# Altium schematic symbol library Passives-LIB-SCH.SchLib: 32 symbols
Pins are listed as number, name and electrical type; pins without a type are passive.

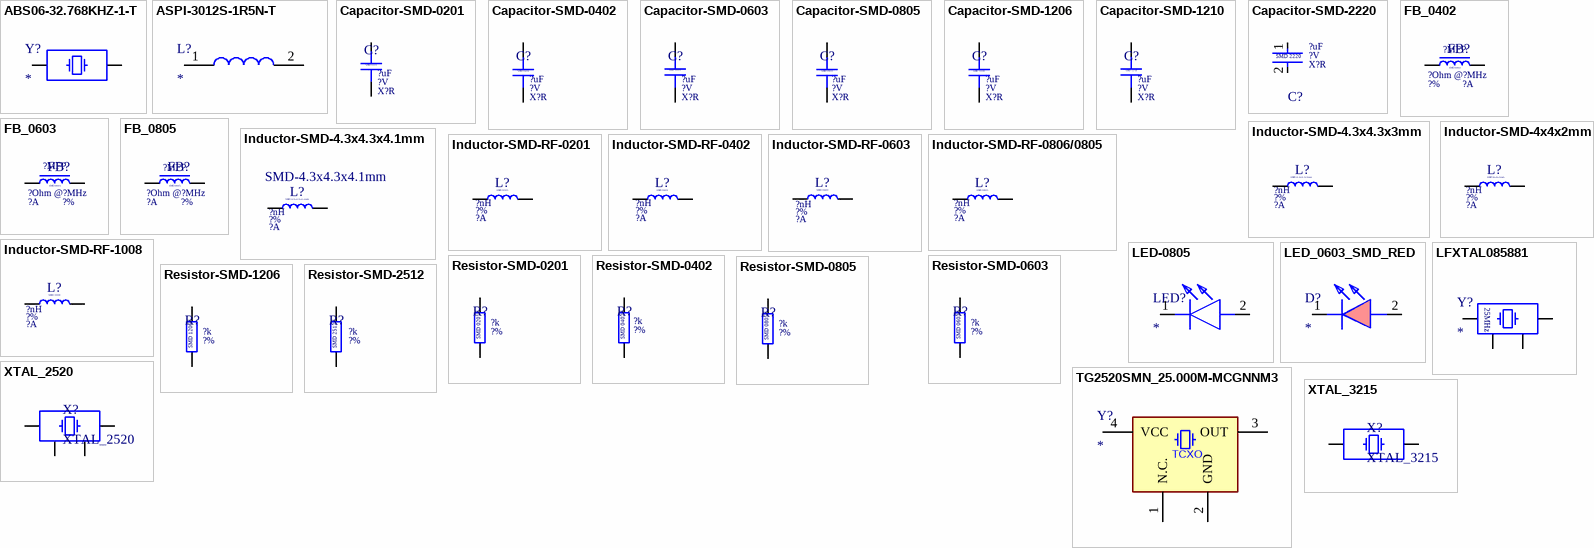
[diagram p0: symbols ABS06-32.768KHZ-1-T to XTAL_3215]

## ABS06-32.768KHZ-1-T
designator Y?
32.768kHz Crystal or Oscillator 12.5pF 20ppm; Manufacturer: ABRACON; Manufacturer Part Number: ABS06-32.768KHZ-1-T; Est Price INR: 90.38; Population Status: YES; Datasheet Link: https://abracon.com/Resonators/ABS06.pdf; Height: 0.6mm; Supplier Part Number: 815-ABS06-32.7K-1-T; Package: 2 mm x 1.2 mm; Supplier: Mouser; Temperature Range: -40 to 85
footprint ABS06
pins: 1, 2

## ASPI-3012S-1R5N-T
designator L?
Inductor; Manufacturer: ABRACON; Manufacturer Part Number: ASPI-3012S-1R5N-T; Inductance: 1.5uH; Tolerance: 30%; Datasheet Link: https://abracon.com/Magnetics/power/ASPI-3012S.pdf; Height: 1.2mm; Supplier Part Number: 815-ASPI-3012S-1R5NT; Package: 3 mm x 3 mm x 1.2 mm; Supplier: Mouser; Temperature Range: -20 to 120
footprint ASPI3012S101MT
pins: 1, 2

## Capacitor-SMD-0201
designator C?, comment Capacitance: ?uF  Dielectric: X?R  Voltage Rating: ?V  (hidden comment: CAP 0201 ?uF ?V)
MLCC SMD 0201 ?uF ?V ?% X?R; Tolerance: ?%
footprint CAP_0201
pins: 1, 2
text: SMD 0201

## Capacitor-SMD-0402
designator C?, comment Capacitance: ?uF  Voltage Rating: ?V  Dielectric: X?R  (hidden comment: CAP 0402 ?uF ?V)
MLCC SMD 0402 ?uF ?V ?% X?R; Tolerance: ?%
footprint CAP_0402
pins: 1, 2
text: SMD 0402

## Capacitor-SMD-0603
designator C?, comment Voltage Rating: ?V  Dielectric: X?R  Capacitance: ?uF  (hidden comment: CAP 0603 ?uF ?V)
MLCC SMD 0603 ?uF ?V ?% X?R; Tolerance: ?%
footprint CAP_0603
pins: 1, 2
text: SMD 0603

## Capacitor-SMD-0805
designator C?, comment Dielectric: X?R  Voltage Rating: ?V  Capacitance: ?uF  (hidden comment: CAP 0805 ?uF ?V)
MLCC SMD 0805 ?uF ?V ?% X?R; Tolerance: ?%
footprint CAP_0805
footprint CAP_0805_SMALL
pins: 1, 2
text: SMD 0805

## Capacitor-SMD-1206
designator C?, comment Dielectric: X?R  Capacitance: ?uF  Voltage Rating: ?V  (hidden comment: CAP 1206 ?uF ?V)
MLCC SMD 1206 ?uF ?V ?% X?R; Tolerance: ?%
footprint CAP_1206
pins: 1, 2
text: SMD 1206

## Capacitor-SMD-1210
designator C?, comment Capacitance: ?uF  Dielectric: X?R  Voltage Rating: ?V  (hidden comment: CAP 1210 ?uF ?V)
MLCC SMD 1210 ?uF ?V ?% X?R; Tolerance: ?%
footprint CAP_1210
pins: 1, 2
text: SMD 1210

## Capacitor-SMD-2220
designator C?, comment Dielectric: X?R  Capacitance: ?uF  Voltage Rating: ?V  (hidden comment: CAP 2220 ?uF ?V)
MLCC SMD 2220 ?uF ?V ?% X?R
footprint CAP_2220
pins: 1, 2
text: SMD 2220

## FB_0402
designator FB?, comment Max DC Current: ?A  Manufacturer Part Number: ?MFP  Impedance: ?Ohm @?MHz  Tolerance: ?%  (hidden comment: FB 0402 ?Ohm @?MHz ?A)
Ferrite Bead SMD 0402 ?Ohm @?MHz ?A ?mOhm DCR; Manufacturer: *
footprint FB_0402
pins: 1, 2
text: SMD 0402

## FB_0603
designator FB?, comment Manufacturer: ?MFP  Max DC Current: ?A  Tolerance: ?%  Impedance: ?Ohm @?MHz  (hidden comment: FB 0603 ?Ohm @?MHz ?A)
Ferrite Bead SMD 0603 ?Ohm @?MHz ?A ?mOhm DCR; Population Status: YES; Manufacturer Part Number: *
footprint FB_0603 (Ferrite Bead 0603)
pins: 1, 2
text: SMD 0603

## FB_0805
designator FB?, comment Impedance: ?Ohm @?MHz  Tolerance: ?%  Max DC Current: ?A  Manufacturer Part Number: ?MFP  (hidden comment: FB 0805 ?Ohm @?MHz ?A)
Ferrite Bead SMD 0805 ?Ohm @?MHz ?A ?mOhm DCR; Population Status: YES; Manufacturer: *
footprint FB_0805
pins: 1, 2
text: SMD 0805

## Inductor-SMD-4.3x4.3x3mm
designator L?, comment Inductance: ?nH  Tolerance: ?%  Max DC Current: ?A  (hidden comment: 74439324010)
Inductor SMD 4.3x4.3x3mm ?nH ?% ?A ?DCR; DCR: ?mOhm; Population Status: YES; Package: SMD-4.3x4.3x3mm
footprint WE-XHMI_4030x3mm (SMD Power Inductor, body 4.30 x 4.30 mm)
pins: 1, 2
text: SMD 4.3x4.3x3mm

## Inductor-SMD-4.3x4.3x4.1mm
designator L?, comment Package: SMD-4.3x4.3x4.1mm  Inductance: ?nH  Tolerance: ?%  Max DC Current: ?A  (hidden comment: 74439325068)
Inductor SMD 4.3x4.3x4.1mm ?nH ?% ?A ?DCR; DCR: ?mOhm; Population Status: YES
footprint WE-XHMI_4040 (SMD Power Inductor, body 4.30 x 4.30 mm)
pins: 1, 2
text: SMD 4.3x4.3x4.1mm

## Inductor-SMD-4x4x2mm
designator L?, comment Inductance: ?nH  Tolerance: ?%  Max DC Current: ?A  (hidden comment: SDCL1V40202R2MR)
Inductor SMD 4x4x2mm ?nH ?% ?A ?DCR; DCR: ?mOhm; Population Status: YES
footprint SDCL1V40202R2MR
pins: 1, 2
text: SMD 4x4x2mm

## Inductor-SMD-RF-0201
designator L?, comment Max DC Current: ?A  Tolerance: ?%  Inductance: ?nH  (hidden comment: IND 0402 ?nH ?% ?A)
Inductor SMD 0201 ?nH ?% ?A ?DCR; Population Status: YES
footprint IND_0201
pins: 1, 2
text: SMD 0201

## Inductor-SMD-RF-0402
designator L?, comment Max DC Current: ?A  Tolerance: ?%  Inductance: ?nH  (hidden comment: IND 0402 ?nH ?% ?A)
Inductor SMD 0402 ?nH ?% ?A ?DCR; Population Status: YES
footprint IND_0402
pins: 1, 2
text: SMD 0402

## Inductor-SMD-RF-0603
designator L?, comment Max DC Current: ?A  Inductance: ?nH  Tolerance: ?%  (hidden comment: IND 0603 ?nH ?% ?A)
Inductor SMD 0603 ?nH ?% ?A ?DCR; Population Status: YES
footprint IND_0603
pins: 1, 2
text: SMD 0603

## Inductor-SMD-RF-0806/0805
designator L?, comment Inductance: ?nH  Tolerance: ?%  Max DC Current: ?A  (hidden comment: IND 0805 ?nH ?% ?A)
Inductor SMD 0805 ?nH ?% ?A ?DCR; DCR: ?mOhm; Population Status: YES
footprint DFE2HCAH1R0MJ0L
pins: 1, 2
text: SMD 0805

## Inductor-SMD-RF-1008
designator L?, comment Max DC Current: ?A  Tolerance: ?%  Inductance: ?nH  (hidden comment: IND 1008 ?nH ?% ?A)
Inductor SMD 1008 ?nH ?% ?A ?DCR; Population Status: YES
footprint 1285ASH1R0MP2
pins: 1, 2
text: SMD 1008

## LED-0805
designator LED?
LED; Manufacturer: Lite-On; Manufacturer Part Number: LTST-C230KFKT; Datasheet Link: https://media.digikey.com/pdf/Data%20Sheets/Lite-On%20PDFs/LTST-C230KFKT_5-24-06.pdf; Height: 1.2mm; Supplier Part Number: 859-LTST-C230KFKT
footprint LEDC3216X120N
pins: 1 K, 2 A

## LED_0603_SMD_RED
designator D?
Single Colour LEDs SMD 0603 Red Clear 631nm; Manufacturer: Lite-On; Manufacturer Part Number: LTST-C190KRKT; Est Price INR: 13.05; Population Status: YES; Datasheet Link: https://media.digikey.com/pdf/Data%20Sheets/Lite-On%20PDFs/LTST-C230KFKT_5-24-06.pdf; Height: 1.2mm; Supplier Part Number: 859-LTST-C190KRKT; Package: SMD 0603; Supplier: Mouser; Temperature Range: -30 to 85; Weight: 28mg
footprint LED_0603_SMD
pins: 1 K, 2 A

## LFXTAL085881
designator Y?
Crystal Oscillator 25MHz; Manufacturer: IDQ; Manufacturer Part Number: LFXTAL085881; Datasheet Link: https://www.mouser.in/datasheet/3/1460/1/LFXTAL085881.pdf; Height: 0.8mm
footprint CRY-SMD-3225
pins: 1, 2, 3, 4
text: 25MHz

## Resistor-SMD-0201
designator R?, comment Tolerance: ?%  Resistance: ?k  (hidden comment: RES 0201 ?k ?%)
Resistor Thin Film SMD 0201 ?k ?% ?W ?ppm; Population Status: YES; Wattage: ?W
footprint RES_0201
pins: 1, 2
text: SMD 0201

## Resistor-SMD-0402
designator R?, comment Tolerance: ?%  Resistance: ?k  (hidden comment: RES 0402 ?k ?%)
Resistor Thin Film SMD 0402 ?k ?% ?W ?ppm; Population Status: YES; Wattage: ?W
footprint RES_0402
pins: 1, 2
text: SMD 0402

## Resistor-SMD-0603
designator R?, comment Tolerance: ?%  Resistance: ?k  (hidden comment: RES 0603 ?k ?%)
Resistor Thin Film SMD 0603 ?k ?% ?W ?ppm; Population Status: YES
footprint RES_0603
pins: 1, 2
text: SMD 0603

## Resistor-SMD-0805
designator R?, comment Tolerance: ?%  Resistance: ?k  (hidden comment: RES 0805 ?k ?%)
Resistor Thin Film SMD 0805 ?k ?% ?W ?ppm; Population Status: YES
footprint RES_0805
pins: 1, 2
text: SMD 0805

## Resistor-SMD-1206
designator R?, comment Tolerance: ?%  Resistance: ?k  (hidden comment: RES 1206 ?k ?%)
Resistor Thin Film SMD 1206 ?k ?% ?W ?ppm; Population Status: YES
footprint RES_1206
pins: 1, 2
text: SMD 1206

## Resistor-SMD-2512
designator R?, comment Tolerance: ?%  Resistance: ?k  (hidden comment: RES 2512 ?k ?%)
Resistor Thin Film SMD 2512 ?k ?% ?W ?ppm; Population Status: YES
footprint RES_2512
pins: 1, 2
text: SMD 2512

## TG2520SMN_25.000M-MCGNNM3
designator Y?
Crystal or Oscillator; Manufacturer: Epson Timing; Manufacturer Part Number: TG2520SMN 25.000M-MCGNNM3; Datasheet Link: https://eu.mouser.com/datasheet/2/137/Epson_TG2016SMN_en_1649545-1889946.pdf; Height: 0.8mm; Supplier Part Number: 732-TG252S25MCGNNM3
footprint TG2520SMN25000MMCGNNM3
pins: 1 N.C., 2 GND, 3 OUT, 4 VCC
text: TCXO

## XTAL_2520
designator X?
Crystal SMD 2520
pins: 1, 2, 3, 4

## XTAL_3215
designator X?
Crystal SMD 3215
pins: 1, 2